# Altium integrated library Miscellaneous.IntLib: 3 symbols
Pins are listed as number, name and electrical type; pins without a type are passive.

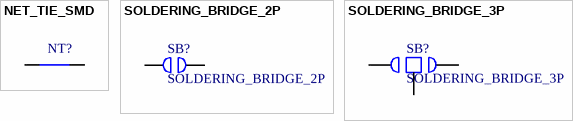
[diagram p0: symbols NET_TIE_SMD to SOLDERING_BRIDGE_3P]

## NET_TIE_SMD
designator NT?, comment NT  (value not drawn)  (net tie, no BOM)
GENERIC NET TIE SMD
footprint NET_TIE_SMD
pins: 1 10, 2 10

## SOLDERING_BRIDGE_2P
designator SB?  (no BOM)
GENERIC SOLDERING BRIDGE 2P
footprint SOLDERING_BRIDGE_2P
pins: 1, 2

## SOLDERING_BRIDGE_3P
designator SB?  (no BOM)
GENERIC SOLDERING BRIDGE 3P
footprint SOLDERING_BRIDGE_3P
pins: 1, 2, 3